# Altium footprint library Amin-Library.PcbLib: 601 footprints (part 6 of 38)
Each footprint in its own frame and in the unit in brackets; x right, y up, seen from the top. Pads: shape width x height; smd on the part's side, far side on the other; paste and mask are expansions set on the pad; w line width, h text height; cw(c..) or ccw(c..) is an arc to the next point about the centre after c.
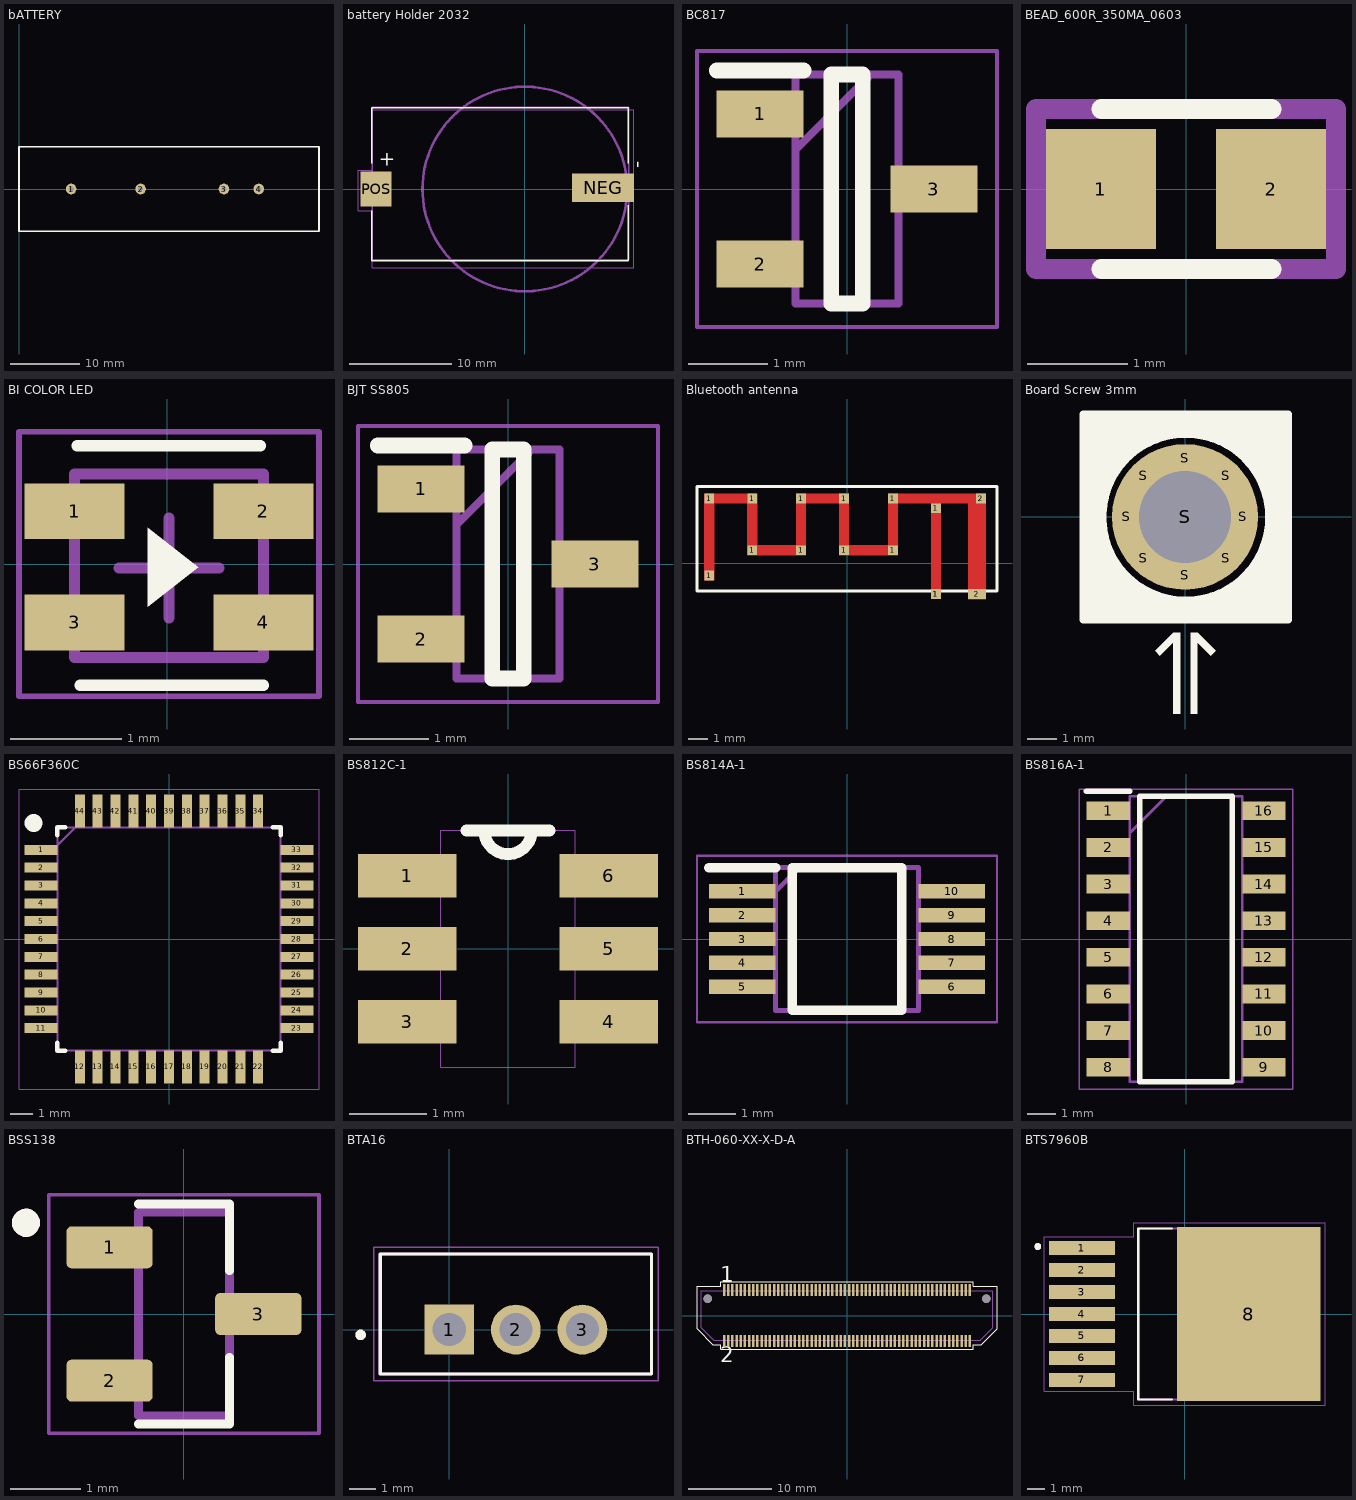
[diagram p5: the footprints below, top view; thin cyan lines are the x and y axes]

## bATTERY [mil] "HHG1D-1"
pads (4):
  round 60 hole 30: 1(295.28,0) 2(688.98,0) 3(1161.42,0) 4(1358.27,0)
Top Overlay:
  lines w10: 0,-240 1700,-240 1700,240 0,240 0,0 0,-240

## battery Holder 2032 [mm]
pads (2):
  rect 6x2.8 smd: NEG(7.62,0.127)
  rect 3x3.45 smd: POS(-14.5,0)
Top Overlay:
  lines w0.127: -14.928,-2.102 -14.928,-6.989 10.072,-6.989 10.072,-1.594 ; -14.928,2.516 -14.928,7.911 10.072,7.911 10.072,2.516
  text "+" at -14.224,2.286 h1.42
  text "-" at 11.557,2.032 h1.42
Top Courtyard:
  lines w0.127: -14.867,-6.919 -14.867,7.981 10.133,7.981 10.133,-6.919 -14.867,-6.919
Mechanical 13:
  text "+" at -14.224,2.286 h1.42
  text "-" at 11.557,2.032 h1.42
Mechanical 15:
  lines w0.05: -16.256,-2.102 -16.256,1.848 -14.863,1.848 -14.863,7.723 10.637,7.723 10.637,-7.677 -14.863,-7.677 -14.863,-2.102 -16.256,-2.102
Mechanical 27:
  circle w0.254: c0,0 r9.972
3D body "s8421-45r_asm.stp": height 5.31, standoff -0.02, extent -14.897,-7.67 9.753,7.925

## BC817 [mm] "SOT23-3"
pads (3):
  rect 1.1x0.6 smd: 1(-1.1,0.95) 2(-1.1,-0.95) 3(1.1,0)
Top Overlay:
  lines w0.2: -1.65,1.5 -0.55,1.5 ; -0.2,-1.45 -0.2,1.45 0.2,1.45 0.2,-1.45 -0.2,-1.45
Mechanical 4:
  lines w0.05: -1.9,-1.75 -1.9,1.75 ; -1.9,-1.75 1.9,-1.75 ; -1.9,-1.75 -1.9,1.75 ; -1.9,-1.75 1.9,-1.75 ; -1.9,1.75 1.9,1.75 ; -1.9,1.75 1.9,1.75 ; 1.9,-1.75 1.9,1.75 ; 1.9,-1.75 1.9,1.75
  lines w0.1: -0.65,-1.45 -0.65,0.5 ; -0.65,-1.45 0.65,-1.45 ; -0.65,-1.45 -0.65,0.5 ; -0.65,-1.45 0.65,-1.45 ; -0.65,0.5 0.3,1.45 ; -0.65,0.5 -0.65,1.45 ; -0.65,0.5 0.3,1.45 ; -0.65,0.5 -0.65,1.45 ; -0.65,1.45 0.3,1.45 ; -0.65,1.45 0.3,1.45 ; 0.3,1.45 0.65,1.45 ; 0.3,1.45 0.65,1.45 ; 0.65,-1.45 0.65,1.45 ; 0.65,-1.45 0.65,1.45
3D body "CircuitWorks-SOT-23.step": height 1.11, standoff 0.01, extent -1.25,-1.5 1.25,1.5

## BEAD_600R_350MA_0603 [mm]
pads (2):
  rect 1.1x1.2 smd paste+0 mask+0.1: 1(-0.85,0) 2(0.85,0)
Top Overlay:
  lines w0.2: -0.845,-0.8 0.857,-0.8 ; -0.845,0.8 0.857,0.8
Mechanical 4:
  lines w0.2: -1.5,-0.8 1.5,-0.8 1.5,0.8 -1.5,0.8 -1.5,-0.8

## BI COLOR LED [mm]
pads (4):
  rect 0.9x0.5 smd: 1(-0.834,0.476) 2(0.866,0.476) 3(-0.834,-0.523) 4(0.866,-0.523)
Top Overlay:
  region: -0.178,0.33 -0.178,-0.381 0.279,-0.025
  lines w0.1: -0.812,1.067 0.838,1.067 ; -0.784,-1.088 0.866,-1.088
Mechanical 13:
  lines w0.1: -0.834,-0.838 -0.834,0.813 0.866,0.813 0.866,-0.838 -0.834,-0.838
Mechanical 15:
  lines w0.05: -1.334,-1.188 -1.334,1.194 1.366,1.194 1.366,-1.188 -1.334,-1.188
  lines w0.1: -0.434,-0.032 0.466,-0.032 ; 0.016,-0.482 0.016,0.418
3D body: height 0.55, standoff 0, extent -0.584,-0.888 0.616,0.762
3D body: height 0.55, standoff 0, extent -0.838,-0.888 -0.584,0.762
3D body: height 0.55, standoff 0, extent 0.61,-0.888 0.866,0.762

## BJT SS805 [mm]
pads (3):
  rect 1.1x0.6 smd: 1(-1.1,0.95) 2(-1.1,-0.95) 3(1.1,0)
Top Overlay:
  lines w0.2: -1.65,1.5 -0.55,1.5 ; -0.2,-1.45 0.2,-1.45 0.2,1.45 -0.2,1.45 -0.2,-1.45
Mechanical 4:
  lines w0.05: -1.9,-1.75 1.9,-1.75 ; -1.9,-1.75 -1.9,1.75 ; -1.9,-1.75 1.9,-1.75 ; -1.9,-1.75 -1.9,1.75 ; -1.9,1.75 1.9,1.75 ; -1.9,1.75 1.9,1.75 ; 1.9,-1.75 1.9,1.75 ; 1.9,-1.75 1.9,1.75
  lines w0.1: -0.65,-1.45 0.65,-1.45 ; -0.65,-1.45 -0.65,0.5 ; -0.65,-1.45 0.65,-1.45 ; -0.65,-1.45 -0.65,0.5 ; -0.65,0.5 -0.65,1.45 ; -0.65,0.5 0.3,1.45 ; -0.65,0.5 -0.65,1.45 ; -0.65,0.5 0.3,1.45 ; -0.65,1.45 0.3,1.45 ; -0.65,1.45 0.3,1.45 ; 0.3,1.45 0.65,1.45 ; 0.3,1.45 0.65,1.45 ; 0.65,-1.45 0.65,1.45 ; 0.65,-1.45 0.65,1.45
3D body "CircuitWorks-SOT-23.step": height 1.11, standoff 0.01, extent -1.25,-1.5 1.25,1.5

## Bluetooth antenna [mm]
pads (15):
  rect 0.5x0.5 smd: 1(-7.05,-0.63) 1(-7.05,3.31) 1(-4.85,0.67) 1(-4.85,3.31) 1(-2.35,0.67) 1(-2.35,3.31) 1(-0.15,0.67) 1(-0.15,3.31) 1(2.35,0.67) 1(2.35,3.31) 1(4.55,2.81) 1(4.55,-1.59) 1(4.55,-1.59) 2(6.85,3.31)
  rect 0.9x0.5 smd: 2(6.65,-1.59)
Top Layer:
  region: -6.8,-0.88 -6.8,3.56 -7.3,3.56 -7.3,-0.88
  region: -4.6,3.06 -4.6,3.559 -7.3,3.559 -7.3,3.06
  region: -5.1,0.92 -5.1,0.42 -2.399,0.42 -2.399,0.92
  region: -4.6,0.42 -4.6,3.56 -5.1,3.56 -5.1,0.42
  region: 2.6,0.42 2.6,3.56 2.1,3.56 2.1,0.42
  region: 4.801,-1.498 4.801,3.31 4.3,3.31 4.3,-1.498
  region: 7.099,-1.84 7.099,3.56 6.2,3.56 6.2,-1.84
  region: 2.6,0.419 2.6,0.919 -0.4,0.919 -0.4,0.419
  region: 0.101,0.42 0.101,3.56 -0.4,3.56 -0.4,0.42
  region: 0.101,3.06 0.101,3.56 -2.6,3.56 -2.6,3.06
  region: -2.1,0.42 -2.1,3.56 -2.6,3.56 -2.6,0.42
  lines w0.5: 2.35,3.31 6.85,3.31
Top Overlay:
  lines w0.15: -7.675,-1.415 -7.675,3.935 7.675,3.935 7.675,-1.415 -7.675,-1.415
Top Solder:
  region: 5.231,-4.01 5.231,-1.09 3.831,-1.09 3.831,-4.01
  lines w0.5: -7.05,-0.63 -7.05,3.31 -4.85,3.31 -4.85,0.67 -2.35,0.67 -2.35,3.31 -0.15,3.31 -0.15,0.67 2.35,0.67 2.35,3.31 6.85,3.31 ; 4.55,-1.59 4.55,3.31
  lines w0.9: 6.65,-1.39 6.65,3.11

## Board Screw 3mm [mm]
height 16
pads (9):
  round 0.6 all layers, no hole: S(-2,0) S(-1.414,-1.414) S(-1.414,1.414) S(0,-2) S(0,2) S(1.414,-1.414) S(1.414,1.414) S(2,0)
  round 5 hole 3.15 mask+0.1: S(0,0)
Top Overlay:
  circle w0.889: c0.025,-0.012 r3.165
  region: 0.433,-3.957 0.253,-4.137 0.882,-4.765 1.062,-4.586
  rectangle: 0.179,-6.751 0.433,-3.957
  region: -0.156,-3.957 -0.41,-3.957 -0.41,-6.751 -0.156,-6.751
  region: -1.038,-4.586 -0.859,-4.765 -0.23,-4.137 -0.41,-3.957
  region: 3.559,3.508 3.556,3.51 0.816,3.51 0.816,3.461 3.559,0.718
  region: 3.559,-3.526 3.556,-3.528 0.816,-3.528 0.816,-3.479 3.559,-0.736
  region: -3.492,-3.528 -3.489,-3.531 -0.749,-3.531 -0.749,-3.482 -3.492,-0.739
  region: -3.492,3.505 -3.489,3.508 -0.749,3.508 -0.749,3.458 -3.492,0.716
  lines w0.254: -3.494,-3.511 -3.494,3.522 3.539,3.522 ; -3.492,-3.528 3.542,-3.528 3.542,3.505
Bottom Overlay:
  circle w0.889: c0.025,-0.012 r3.165
  region: 3.559,3.508 3.556,3.51 0.816,3.51 0.816,3.461 3.559,0.718
  region: 3.559,-3.526 3.556,-3.528 0.816,-3.528 0.816,-3.479 3.559,-0.736
  region: -3.492,3.505 -3.489,3.508 -0.749,3.508 -0.749,3.458 -3.492,0.716
  region: -3.492,-3.528 -3.489,-3.531 -0.749,-3.531 -0.749,-3.482 -3.492,-0.739
  lines w0.254: -3.494,-3.511 -3.494,3.522 3.539,3.522 ; -3.492,-3.528 3.542,-3.528 3.542,3.505

## BS66F360C [mm] "QFP80P1200X1200X160-44N"
height 1.5
pads (44):
  rect 1.475x0.45 smd paste-1: 1(-5.738,4) 2(-5.738,3.2) 3(-5.738,2.4) 4(-5.738,1.6) 5(-5.738,0.8) 6(-5.738,0) 7(-5.738,-0.8) 8(-5.738,-1.6) 9(-5.738,-2.4) 10(-5.738,-3.2) 11(-5.738,-4) 23(5.738,-4) 24(5.738,-3.2) 25(5.738,-2.4) 26(5.738,-1.6) 27(5.738,-0.8) 28(5.738,0) 29(5.738,0.8) 30(5.738,1.6) 31(5.738,2.4) 32(5.738,3.2) 33(5.738,4)
  rect 0.45x1.475 smd paste-1: 12(-4,-5.738) 13(-3.2,-5.738) 14(-2.4,-5.738) 15(-1.6,-5.738) 16(-0.8,-5.738) 17(0,-5.738) 18(0.8,-5.738) 19(1.6,-5.738) 20(2.4,-5.738) 21(3.2,-5.738) 22(4,-5.738) 34(4,5.738) 35(3.2,5.738) 36(2.4,5.738) 37(1.6,5.738) 38(0.8,5.738) 39(0,5.738) 40(-0.8,5.738) 41(-1.6,5.738) 42(-2.4,5.738) 43(-3.2,5.738) 44(-4,5.738)
Top Overlay:
  circle w0.4: c-6.075,5.2 r0.2
  lines w0.2: -5,-4.65 -5,-5 -4.65,-5 ; -5,4.65 -5,5 -4.65,5 ; 4.65,-5 5,-5 5,-4.65 ; 4.65,5 5,5 5,4.65
Top Paste:
  rectangle: 4.995,3.825 6.475,4.175
  rectangle: 4.995,3.025 6.475,3.375
  rectangle: 4.995,2.225 6.475,2.575
  rectangle: 4.995,1.425 6.475,1.775
  rectangle: 4.995,0.625 6.475,0.975
  rectangle: 4.995,-0.175 6.475,0.175
  rectangle: 4.995,-0.975 6.475,-0.625
  rectangle: 4.995,-1.775 6.475,-1.425
  rectangle: 4.995,-2.575 6.475,-2.225
  rectangle: 4.995,-3.375 6.475,-3.025
  rectangle: 4.995,-4.175 6.475,-3.825
  rectangle: -6.481,3.825 -5.001,4.175
  rectangle: -6.481,3.025 -5.001,3.375
  rectangle: -6.481,2.225 -5.001,2.575
  rectangle: -6.481,1.425 -5.001,1.775
  rectangle: -6.481,0.625 -5.001,0.975
  rectangle: -6.481,-0.175 -5.001,0.175
  rectangle: -6.481,-0.975 -5.001,-0.625
  rectangle: -6.481,-1.775 -5.001,-1.425
  rectangle: -6.481,-2.575 -5.001,-2.225
  rectangle: -6.481,-3.375 -5.001,-3.025
  rectangle: -6.481,-4.175 -5.001,-3.825
  region: -3.825,-6.481 -3.825,-5.001 -4.175,-5.001 -4.175,-6.481
  region: -3.025,-6.481 -3.025,-5.001 -3.375,-5.001 -3.375,-6.481
  region: -2.225,-6.481 -2.225,-5.001 -2.575,-5.001 -2.575,-6.481
  region: -1.425,-6.481 -1.425,-5.001 -1.775,-5.001 -1.775,-6.481
  region: -0.625,-6.481 -0.625,-5.001 -0.975,-5.001 -0.975,-6.481
  region: 0.175,-6.481 0.175,-5.001 -0.175,-5.001 -0.175,-6.481
  region: 0.975,-6.481 0.975,-5.001 0.625,-5.001 0.625,-6.481
  region: 1.775,-6.481 1.775,-5.001 1.425,-5.001 1.425,-6.481
  region: 2.575,-6.481 2.575,-5.001 2.225,-5.001 2.225,-6.481
  region: 3.375,-6.481 3.375,-5.001 3.025,-5.001 3.025,-6.481
  region: 4.175,-6.481 4.175,-5.001 3.825,-5.001 3.825,-6.481
  region: -3.825,4.995 -3.825,6.475 -4.175,6.475 -4.175,4.995
  region: -3.025,4.995 -3.025,6.475 -3.375,6.475 -3.375,4.995
  region: -2.225,4.995 -2.225,6.475 -2.575,6.475 -2.575,4.995
  region: -1.425,4.995 -1.425,6.475 -1.775,6.475 -1.775,4.995
  region: -0.625,4.995 -0.625,6.475 -0.975,6.475 -0.975,4.995
  region: 0.175,4.995 0.175,6.475 -0.175,6.475 -0.175,4.995
  region: 0.975,4.995 0.975,6.475 0.625,6.475 0.625,4.995
  region: 1.775,4.995 1.775,6.475 1.425,6.475 1.425,4.995
  region: 2.575,4.995 2.575,6.475 2.225,6.475 2.225,4.995
  region: 3.375,4.995 3.375,6.475 3.025,6.475 3.025,4.995
  region: 4.175,4.995 4.175,6.475 3.825,6.475 3.825,4.995
Top Courtyard:
  lines w0.05: -6.725,-6.725 6.725,-6.725 6.725,6.725 -6.725,6.725 -6.725,-6.725
Mechanical 13:
  lines w0.1: -5,4.2 -4.2,5 ; -5,-5 -5,5 5,5 5,-5 -5,-5
3D body "BS66F360.stp": height 1.6, standoff 0, extent -6,-6 6,6

## BS812C-1 [mil] "SOT23-6"
pads (6):
  rect 50x22 smd: 1(-51,37) 2(-51,0) 3(-51,-37) 4(51,-37) 5(51,0) 6(51,37)
Top Overlay:
  lines w6: -21,60 -12,60 ; 21,60 12,60 ; -12,60 ccw(c0,60) 12,60 ; -12,60 12,60
Mechanical 4:
  lines w0: -59,-47 -59,-28 ; -59,-47 -34,-47 ; -59,-47 -59,-28 ; -59,-47 -34,-47 ; -59,-28 -34,-28 ; -59,-28 -34,-28 ; -59,-10 -59,10 ; -59,-10 -34,-10 ; -59,-10 -59,10 ; -59,-10 -34,-10 ; -59,10 -34,10 ; -59,10 -34,10 ; -59,28 -59,47 ; -59,28 -34,28 ; -59,28 -59,47 ; -59,28 -34,28 ; -59,47 -34,47 ; -59,47 -34,47 ; -34,-60 34,-60 ; -34,-60 -34,-47 ; -34,-60 34,-60 ; -34,-60 -34,-47 ; -34,-47 -34,-28 ; -34,-47 -34,-28 ; -34,-28 -34,-10 ; -34,-28 -34,-10 ; -34,-10 -34,10 ; -34,-10 -34,10 ; -34,10 -34,28 ; -34,10 -34,28 ; -34,28 -34,47 ; -34,28 -34,47 ; -34,47 -34,60 ; -34,47 -34,60 ; -34,60 -12,60 ; -34,60 -12,60 ; -12,60 ccw(c0,60) 12,60 ; -12,60 ccw(c0,60) 12,60 ; -12,60 12,60 ; -12,60 12,60 ; 12,60 34,60 ; 12,60 34,60 ; 34,-60 34,-47 ; 34,-60 34,-47 ; 34,-47 34,-28 ; 34,-47 59,-47 ; 34,-47 34,-28 ; 34,-47 59,-47 ; 34,-28 34,-10 ; 34,-28 59,-28 ; 34,-28 34,-10 ; 34,-28 59,-28 ; 34,-10 34,10 ; 34,-10 59,-10 ; 34,-10 34,10 ; 34,-10 59,-10 ; 34,10 34,28 ; 34,10 59,10 ; 34,10 34,28 ; 34,10 59,10 ; 34,28 34,47 ; 34,28 59,28 ; 34,28 34,47 ; 34,28 59,28 ; 34,47 34,60 ; 34,47 59,47 ; 34,47 34,60 ; 34,47 59,47 ; 59,-47 59,-28 ; 59,-47 59,-28 ; 59,-10 59,10 ; 59,-10 59,10 ; 59,28 59,47 ; 59,28 59,47
3D body "User Library-SOT23-6-2.STEP": height 57.09, standoff 0, extent -55.11,-57.09 55.13,57.08

## BS814A-1 [mm]
pads (10):
  rect 1.4x0.3 smd: 1(-2.2,1) 2(-2.2,0.5) 3(-2.2,0) 4(-2.2,-0.5) 5(-2.2,-1) 6(2.2,-1) 7(2.2,-0.5) 8(2.2,0) 9(2.2,0.5) 10(2.2,1)
Top Overlay:
  lines w0.2: -2.9,1.5 -1.5,1.5 ; -1.15,-1.5 1.15,-1.5 1.15,1.5 -1.15,1.5 -1.15,-1.5
Mechanical 13:
  lines w0.1: -1.5,1 -1,1.5 ; -1.5,-1.5 1.5,-1.5 1.5,1.5 -1.5,1.5 -1.5,-1.5
Mechanical 15:
  lines w0.05: -3.15,-1.75 3.15,-1.75 3.15,1.75 -3.15,1.75 -3.15,-1.75
3D body "BS814A-1.stp": height 1.1, standoff 0, extent -2.45,-1.5 2.45,1.5

## BS816A-1 [mm]
pads (16):
  rect 1.5x0.65 smd: 1(-2.7,4.445) 2(-2.7,3.175) 3(-2.7,1.905) 4(-2.7,0.635) 5(-2.7,-0.635) 6(-2.7,-1.905) 7(-2.7,-3.175) 8(-2.7,-4.445) 9(2.7,-4.445) 10(2.7,-3.175) 11(2.7,-1.905) 12(2.7,-0.635) 13(2.7,0.635) 14(2.7,1.905) 15(2.7,3.175) 16(2.7,4.445)
Top Overlay:
  lines w0.2: -3.45,5.12 -1.95,5.12 ; -1.6,-4.95 -1.6,4.95 1.6,4.95 1.6,-4.95 -1.6,-4.95
Mechanical 13:
  lines w0.1: -1.95,3.68 -0.68,4.95 ; -1.95,-4.95 -1.95,4.95 1.95,4.95 1.95,-4.95 -1.95,-4.95
Mechanical 15:
  lines w0.05: -3.7,-5.2 -3.7,5.2 3.7,5.2 3.7,-5.2 -3.7,-5.2
3D body "BS816A-1.stp": height 1.75, standoff 0, extent -3,-4.95 3,4.95

## BSS138 [mm] "SOT23-3"
pads (3):
  rrect25% 1.23x0.6 smd: 1(-1.06,0.95) 2(-1.06,-0.95) 3(1.06,0)
Top Overlay:
  circle w0.2: c-2.25,1.3 r0.1
  lines w0.127: -0.65,-1.57 0.65,-1.57 0.65,-0.62 ; -0.65,1.57 0.65,1.57 0.65,0.62
Mechanical 13:
  circle w0.2: c-2.25,1.3 r0.1
  lines w0.127: -0.65,-1.45 0.65,-1.45 0.65,1.45 -0.65,1.45 -0.65,-1.45
Mechanical 15:
  lines w0.05: -1.925,-1.7 -1.925,1.7 1.925,1.7 1.925,-1.7 -1.925,-1.7
3D body "SOT-23.STEP": height 1, standoff 0, extent -1.3,-1.45 1.3,1.45

## BTA16 [mm]
pads (3):
  rect 1.91x1.91 hole 1.27: 1(0,0)
  round 1.91 hole 1.27: 2(2.55,0) 3(5.1,0)
Top Overlay:
  circle w0.2: c-3.4,-0.2 r0.1
  lines w0.127: -2.65,-1.7 -2.65,2.9 7.75,2.9 7.75,-1.7 -2.65,-1.7
Mechanical 13:
  circle w0.2: c-3.4,-0.2 r0.1
  lines w0.127: -2.65,-1.7 7.75,-1.7 7.75,2.9 -2.65,2.9 -2.65,-1.7
Mechanical 15:
  lines w0.05: -2.9,-1.95 8,-1.95 8,3.15 -2.9,3.15 -2.9,-1.95
3D body "BTA16-800BRG.STEP": height 19.63, standoff -9.54, extent -2.56,-3.81 7.64,3.082

## BTH-060-XX-X-D-A [mil]
pads (122):
  rect 12x57 smd: 1(-581.15,121.5) 2(-581.15,-121.5) 3(-561.45,121.5) 4(-561.45,-121.5) 5(-541.75,121.5) 6(-541.75,-121.5) 7(-522.05,121.5) 8(-522.05,-121.5) 9(-502.35,121.5) 10(-502.35,-121.5) 11(-482.65,121.5) 12(-482.65,-121.5) 13(-462.95,121.5) 14(-462.95,-121.5) 15(-443.25,121.5) 16(-443.25,-121.5) 17(-423.55,121.5) 18(-423.55,-121.5) 19(-403.85,121.5) 20(-403.85,-121.5) 21(-384.15,121.5) 22(-384.15,-121.5) 23(-364.45,121.5) 24(-364.45,-121.5) 25(-344.75,121.5) 26(-344.75,-121.5) 27(-325.05,121.5) 28(-325.05,-121.5) 29(-305.35,121.5) 30(-305.35,-121.5) 31(-285.65,121.5) 32(-285.65,-121.5) 33(-265.95,121.5) 34(-265.95,-121.5) 35(-246.25,121.5) 36(-246.25,-121.5) 37(-226.55,121.5) 38(-226.55,-121.5) 39(-206.85,121.5) 40(-206.85,-121.5) 41(-187.15,121.5) 42(-187.15,-121.5) 43(-167.45,121.5) 44(-167.45,-121.5) 45(-147.75,121.5) 46(-147.75,-121.5) 47(-128.05,121.5) 48(-128.05,-121.5) 49(-108.35,121.5) 50(-108.35,-121.5) 51(-88.65,121.5) 52(-88.65,-121.5) 53(-68.95,121.5) 54(-68.95,-121.5) 55(-49.25,121.5) 56(-49.25,-121.5) 57(-29.55,121.5) 58(-29.55,-121.5) 59(-9.85,121.5) 60(-9.85,-121.5) 61(9.85,121.5) 62(9.85,-121.5) 63(29.55,121.5) 64(29.55,-121.5) 65(49.25,121.5) 66(49.25,-121.5) 67(68.95,121.5) 68(68.95,-121.5) 69(88.65,121.5) 70(88.65,-121.5) 71(108.35,121.5) 72(108.35,-121.5) 73(128.05,121.5) 74(128.05,-121.5) 75(147.75,121.5) 76(147.75,-121.5) 77(167.45,121.5) 78(167.45,-121.5) 79(187.15,121.5) 80(187.15,-121.5) 81(206.85,121.5) 82(206.85,-121.5) 83(226.55,121.5) 84(226.55,-121.5) 85(246.25,121.5) 86(246.25,-121.5) 87(265.95,121.5) 88(265.95,-121.5) 89(285.65,121.5) 90(285.65,-121.5) 91(305.35,121.5) 92(305.35,-121.5) 93(325.05,121.5) 94(325.05,-121.5) 95(344.75,121.5) 96(344.75,-121.5) 97(364.45,121.5) 98(364.45,-121.5) 99(384.15,121.5) 100(384.15,-121.5) 101(403.85,121.5) 102(403.85,-121.5) 103(423.55,121.5) 104(423.55,-121.5) 105(443.25,121.5) 106(443.25,-121.5) 107(462.95,121.5) 108(462.95,-121.5) 109(482.65,121.5) 110(482.65,-121.5) 111(502.35,121.5) 112(502.35,-121.5) 113(522.05,121.5) 114(522.05,-121.5) 115(541.75,121.5) 116(541.75,-121.5) 117(561.45,121.5) 118(561.45,-121.5) 119(581.15,121.5) 120(581.15,-121.5)
  round 40 hole 40 unplated: None(-659.1,80) None(659.1,80)
Top Overlay:
  lines w5: -709.4,-62.5 -709.4,137.5 -597.15,137.5 -597.15,160 597.15,160 597.15,137.5 709.4,137.5 709.4,-62.5 634.4,-137.5 597.15,-137.5 597.15,-160 -597.15,-160 -597.15,-137.5 -634.4,-137.5 -709.4,-62.5
  text "2" at -598.69,-219.91 h73.82
  text "1" at -599.05,160.31 h73.82
Mechanical 1:
  lines w5: -689.4,-57.5 -689.4,117.5 689.4,117.5 689.4,-57.5 629.4,-117.5 -629.4,-117.5 -689.4,-57.5
3D body "strip_bth-060-01-f-d.stp": height 168.5, standoff 0.5, extent -689.1,-140 689.11,140

## BTS7960B [mm] "High Current PN Half Bridge P-TO-263-7"
pads (8):
  rect 3.81x0.8 smd: 1(-5.95,3.81) 2(-5.95,2.54) 3(-5.95,1.27) 4(-5.95,0) 5(-5.95,-1.27) 6(-5.95,-2.54) 7(-5.95,-3.81)
  rect 8.29x10.07 smd paste-6: 8(3.71,0)
Top Overlay:
  circle w0.2: c-8.5,3.9 r0.1
  lines w0.127: -0.749,-4.95 -2.69,-4.95 -2.69,4.95 -0.749,4.95
Top Paste:
  region: 1.625,3.215 0.275,3.215 0.275,4.865 1.625,4.865
  region: 1.625,1.195 0.275,1.195 0.275,2.845 1.625,2.845
  region: 1.625,-0.825 0.275,-0.825 0.275,0.825 1.625,0.825
  region: 1.625,-2.845 0.275,-2.845 0.275,-1.195 1.625,-1.195
  region: 1.625,-4.865 0.275,-4.865 0.275,-3.215 1.625,-3.215
  region: 7.145,-4.865 5.795,-4.865 5.795,-3.215 7.145,-3.215
  region: 7.145,-2.845 5.795,-2.845 5.795,-1.195 7.145,-1.195
  region: 7.145,-0.825 5.795,-0.825 5.795,0.825 7.145,0.825
  region: 7.145,1.195 5.795,1.195 5.795,2.845 7.145,2.845
  region: 7.145,3.215 5.795,3.215 5.795,4.865 7.145,4.865
  region: 4.385,-4.865 3.035,-4.865 3.035,-3.215 4.385,-3.215
  region: 4.385,-2.845 3.035,-2.845 3.035,-1.195 4.385,-1.195
  region: 4.385,3.215 3.035,3.215 3.035,4.865 4.385,4.865
  region: 4.385,1.195 3.035,1.195 3.035,2.845 4.385,2.845
  region: 4.385,-0.825 3.035,-0.825 3.035,0.825 4.385,0.825
Mechanical 13:
  circle w0.2: c-8.5,3.9 r0.1
  lines w0.127: -2.69,-4.95 -2.69,4.95 6.71,4.95 6.71,-4.95 -2.69,-4.95
Mechanical 15:
  lines w0.05: -8.11,-4.46 -8.11,4.46 -2.94,4.46 -2.94,5.29 8.11,5.29 8.11,-5.29 -2.94,-5.29 -2.94,-4.46 -8.11,-4.46
3D body "User Library-TO263-7-1-1.STEP": height 4.81, standoff 0.01, extent -7.93,-5 7.74,5